# Altium schematic symbol library MPD_BA4AAPC.SchLib: 1 symbol
Pins are listed as number, name and electrical type; pins without a type are passive.

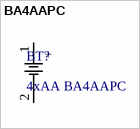
[diagram p0: symbol BA4AAPC]

## BA4AAPC
designator BT?, comment 4xAA BA4AAPC
Battery holder, 4 x AA in series (6 V), PC pins, MPD BA4AAPC; Manufacturer: MPD (Memory Protection Devices); Nominal Voltage: 6V (alkaline); Pin 1: pack + (outer pin; inferred from MPD drawing rev H, meter-check a real holder); Component Type: Battery holder; Cells: 4 x AA in series; Height Above Board: 15.88mm; Manufacturer Part Number: BA4AAPC; Supplier: Digi-Key; Supplier Part Number: 2439225; LCSC Part #: C6748055
footprint MPD_BA4AAPC_4AA_PC (MPD BA4AAPC rev H PCB layout)
pins: 1 +, 2 -